# Altium footprint library Switch$.PcbLib: 117 footprints (part 5 of 8)
Each footprint in its own frame and in the unit in brackets; x right, y up, seen from the top. Pads: shape width x height; smd on the part's side, far side on the other; paste and mask are expansions set on the pad; w line width, h text height; cw(c..) or ccw(c..) is an arc to the next point about the centre after c.
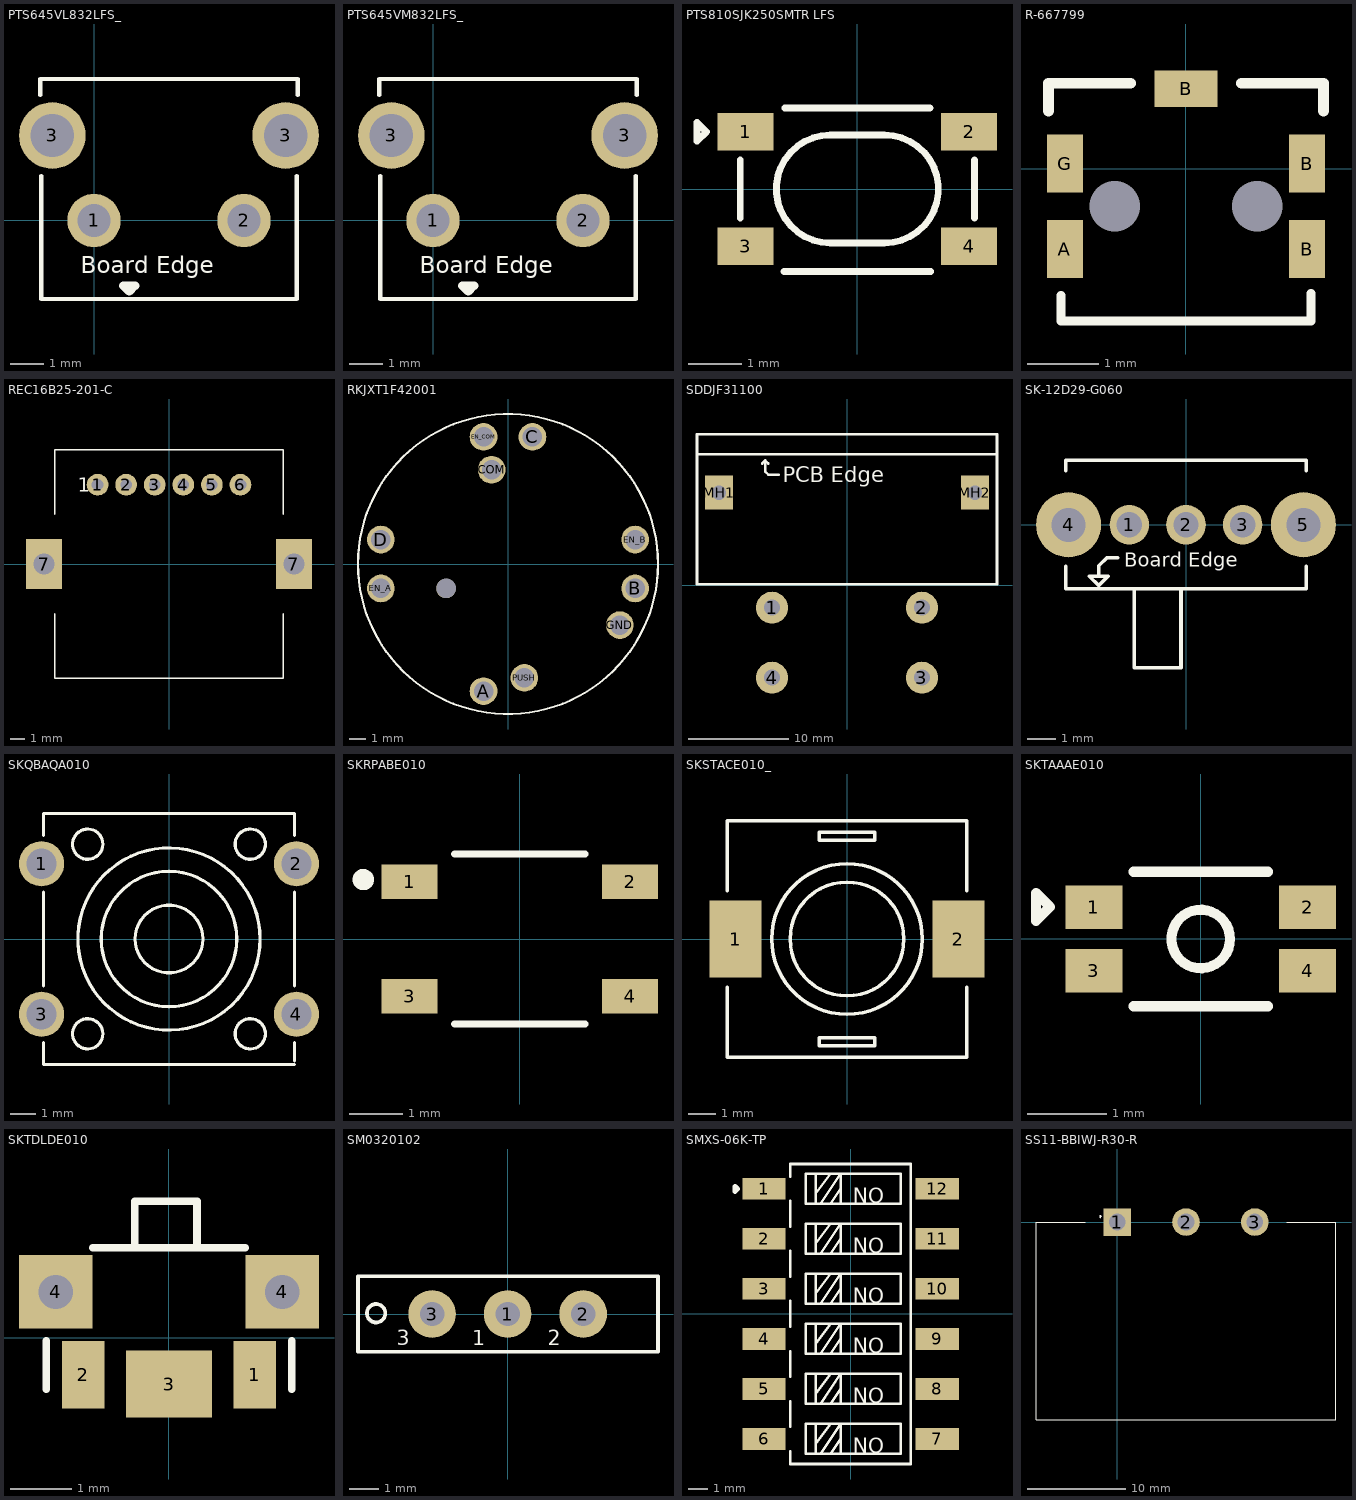
[diagram p4: the footprints below, top view; thin cyan lines are the x and y axes]

## PTS645VL832LFS_ [mm]
pads (4):
  round 1.6 hole 1: 1(0,0) 2(4.5,0)
  round 2 hole 1.3: 3(-1.25,2.55) 3(5.75,2.55)
Top Overlay:
  lines w0.127: -1.611,3.764 -1.611,4.247 6.111,4.247 6.111,3.764 ; -1.585,1.336 -1.585,-2.357 6.085,-2.357 6.085,1.336 6.085,-1.9
  lines w0.254: 0.878,-1.951 1.234,-1.951 1.056,-2.129 0.878,-1.951
  text "Board Edge" at -0.392,-1.578 h0.51
3D body "PTS645VK83-2LFS.stp": height 7.5, standoff -3.85, extent -1.997,-8.304 6.497,4.196

## PTS645VM832LFS_ [mm]
pads (4):
  round 1.6 hole 1: 1(0,0) 2(4.5,0)
  round 2 hole 1.3: 3(-1.25,2.55) 3(5.75,2.55)
Top Overlay:
  lines w0.127: -1.611,3.764 -1.611,4.247 6.111,4.247 6.111,3.764 ; -1.585,1.336 -1.585,-2.357 6.085,-2.357 6.085,1.336 6.085,-1.9
  lines w0.254: 0.878,-1.951 1.056,-2.129 1.234,-1.951 0.878,-1.951
  text "Board Edge" at -0.392,-1.578 h0.51
3D body "PTS645VK83-2LFS.stp": height 7.5, standoff -3.85, extent -1.997,-8.304 6.497,4.196

## PTS810SJK250SMTR LFS [mm]
pads (4):
  rect 1.05x0.7 smd: 1(-2.1,1.075) 2(2.1,1.075) 3(-2.1,-1.075) 4(2.1,-1.075)
Top Overlay:
  lines w0.127: -2.2,-0.544 -2.2,0.544 ; -1.381,-1.55 1.381,-1.55 ; -1.366,1.524 1.366,1.524 ; 2.2,-0.544 2.2,0.544 ; -3.014,0.897 -2.837,1.075 -3.014,1.253 -3.014,0.897 ; -0.508,-1.016 cw(c-0.508,0) -0.508,1.016 0.508,1.016 cw(c0.508,0) 0.508,-1.016 -0.508,-1.016
3D body "C221896.step": height 2.51, standoff 0, extent -2.349,-1.6 2.349,1.601

## R-667799 [mm]
pads (7):
  round 0 hole 0.711 unplated: 6(-1,-0.525) 7(1,-0.525)
  rect 0.508x0.813 smd: A(-1.7,-1.125) B(1.7,-1.125) B(1.7,0.075) G(-1.7,0.075)
  rect 0.889x0.508 smd: B(0,1.125)
Top Overlay:
  lines w0.127: -1.753,-1.778 -1.753,-2.134 1.753,-2.134 1.753,-1.753
  lines w0.152: -1.93,0.814 -1.93,1.202 -0.777,1.202 ; 0.777,1.202 1.93,1.202 1.93,0.814
3D body "R-667799.stp": height 1, standoff -0.4, extent -1.75,-2.083 1.75,1.567

## REC16B25-201-C [mm]
pads (8):
  round 1.524 hole 0.82: 1(-5,5.55) 2(-3,5.55) 3(-1,5.55) 4(1,5.55) 5(3,5.55) 6(5,5.55)
  rect 2.5x3.5 hole 1.5 square: 7(-8.75,0) 7(8.75,0)
Top Overlay:
  lines w0.127: -8,-3.481 -8,-8 8,-8 8,-3.481 ; -8,3.481 -8,8 8,8 8,3.481
  text "1" at -6.404,5.051 h1
3D body "REC16B25-201-C.STEP": height 35, standoff -3.1, extent -8.3,-7.949 8.3,8.051

## RKJXT1F42001 [mm]
pads (11):
  round 1.7 hole 1.2: A(-1.5,-7.8) B(7.8,-1.5) C(1.5,7.8) COM(-1,5.78) D(-7.8,1.5) EN_A(-7.8,-1.5) EN_B(7.8,1.5) EN_COM(-1.5,7.8) GND(6.86,-3.75) PUSH(1,-6.98)
  round 1.2 hole 1.2 unplated: ""(-3.8,-1.5)
Top Overlay:
  circle w0.127: c0,0 r9.2
3D body "RKJXT1F42001.stp": height 17.4, standoff -3.22, extent -8.6,-8.6 8.6,8.6

## SDDJF31100 [mm]
pads (6):
  round 3.2 hole 1.6: 1(-7.5,-2.25) 2(7.5,-2.25) 3(7.5,-9.25) 4(-7.5,-9.25)
  rect 2.8x3.4 hole 1.42 square: MH1(-12.8,9.25) MH2(12.8,9.25)
Top Overlay:
  lines w0.254: -8.484,12.167 -8.179,12.471 ; -7.874,12.167 -8.179,12.471 ; -6.807,11.049 -7.874,11.049 -8.179,11.354 -8.179,12.471 ; -15,13.081 -15,0.081 15,0.081 15,13.081 ; -15,13.081 -15,15.081 0,15.081 15,15.081 15,13.081 ; -15,13.081 0,13.081 15,13.081
  text "PCB Edge" at -6.426,10.287 h1.52
3D body "sddjf31100.STEP": height 17.5, standoff -1, extent -15.028,-9.621 14.977,20.079

## SK-12D29-G060 [mm]
pads (5):
  round 1.4 hole 0.9: 1(-2,0) 2(0,0) 3(2,0)
  round 2.3 hole 1.2: 4(-4.15,0) 5(4.15,0)
Top Overlay:
  lines w0.127: -4.255,-1.473 -4.255,-2.258 4.255,-2.258 4.255,-1.473 ; -4.255,1.918 -4.255,2.283 4.255,2.283 4.255,1.918 ; -3.086,-1.816 -3.086,-1.453 -2.794,-1.161 -2.414,-1.161 ; -1.829,-2.261 -1.829,-5.055 -0.178,-5.055 -0.178,-2.261 ; -3.416,-1.816 -3.086,-2.146 -2.756,-1.816 -3.416,-1.816
  text "Board Edge" at -2.183,-1.48 h0.5
3D body "G-Switch SK-12D29-G060.STEP": height 3.67, standoff -2.13, extent -4.304,-5.004 4.304,2.246

## SKQBAQA010 [mm]
pads (4):
  round 1.8 hole 1.2 paste-2539.97 mask+0.051: 1(-5.08,3) 2(5.08,3) 3(-5.08,-3) 4(5.08,-3)
Top Overlay:
  circle w0.127: c0,0 r3.632
  circle w0.127: c0,0 r2.7
  circle w0.127: c0,0 r1.35
  circle w0.127: c-3.24,3.78 r0.604
  circle w0.127: c3.24,3.78 r0.604
  circle w0.127: c3.24,-3.78 r0.604
  circle w0.127: c-3.24,-3.78 r0.604
  lines w0.127: -5,-4.128 -5,-5 5,-5 ; -5,-1.872 -5,1.872 ; -5,4.128 -5,5 5,5 5,4.128 ; 5,-4.86 5,-4.128 ; 5,-1.872 5,1.872
3D body "ALPSALPINE SKQBAQA010.STEP": height 23.2, standoff -3.52, extent -5.789,-5 5.789,5

## SKRPABE010 [mm]
height 2.5
pads (4):
  rect 1.05x0.65 smd: 1(-2.075,1.075) 2(2.075,1.075) 3(-2.075,-1.075) 4(2.075,-1.075)
Top Overlay:
  circle w0.2: c-2.946,1.118 r0.1
  lines w0.127: -1.23,-1.6 1.23,-1.6 ; -1.23,1.6 1.23,1.6
3D body "step_temp.STEP": height 2.5, standoff 0, extent -2.3,-1.6 2.3,1.6

## SKSTACE010_ [mm]
pads (2):
  rect 1.9x2.8 smd: 1(-4.05,0) 2(4.05,0)
Top Overlay:
  circle w0.127: c0,0 r2.738
  circle w0.127: c0,0 r2.067
  lines w0.127: -4.343,-1.753 -4.343,-4.293 4.343,-4.293 4.343,-1.753 ; -4.343,1.753 -4.343,4.293 4.343,4.293 4.343,1.753 ; -1,-3.881 0,-3.881 1,-3.881 1,-3.581 0,-3.581 -1,-3.581 -1,-3.881 ; -1,3.581 -1,3.881 0,3.881 1,3.881 1,3.581 0,3.581 -1,3.581
3D body "skstace010.stp": height 4, standoff 0.04, extent -4.3,-4.25 4.3,4.25

## SKTAAAE010 [mm]
pads (4):
  rect 0.72x0.55 smd: 1(-1.35,0.4) 2(1.35,0.4) 3(-1.35,-0.4) 4(1.35,-0.4)
Top Overlay:
  circle w0.127: c0,0 r0.37
  lines w0.127: -0.85,-0.85 0.85,-0.85 ; -0.85,0.85 0.85,0.85 ; -2.083,0.229 -1.905,0.406 -2.083,0.584 -2.083,0.229
3D body "C358616.step": height 0.54, standoff 0, extent -1.5,-0.8 1.5,0.8

## SKTDLDE010 [mm]
pads (5):
  rect 0.7x1.1 smd: 1(1.4,-0.599) 2(-1.4,-0.599)
  rect 1.4x1.1 smd: 3(0,-0.751)
  rect 1.2x1.2 hole 0.56: 4(-1.85,0.751) 4(1.85,0.751)
Top Overlay:
  lines w0.127: -2.007,-0.838 -2.007,-0.051 ; -1.245,1.473 -0.559,1.473 ; 1.245,1.473 0.457,1.473 ; 2.007,-0.838 2.007,-0.051 ; -0.559,1.473 0.457,1.473 ; -0.559,1.473 -0.559,2.235 0.457,2.235 0.457,1.473
3D body "SKTDLDE010.STEP": height 1.55, standoff -0.45, extent -1.95,-0.815 1.95,2.235

## SM0320102 [mm]
pads (3):
  round 1.6 hole 0.82: 1(0,0) 2(2.54,0) 3(-2.54,0)
Top Overlay:
  circle w0.127: c-4.42,0.025 r0.31
  lines w0.127: -5.029,-1.27 5.055,-1.27 5.055,1.27 -5.029,1.27 -5.029,-1.27
  text "2" at 1.353,-1.043 h0.5
  text "1" at -1.187,-1.043 h0.5
  text "3" at -3.727,-1.043 h0.5
3D body "sm-03201-02.stp": height 1.4, standoff -10, extent -5,-1.22 5.001,1.22

## SMXS-06K-TP [mm]
pads (12):
  rect 2.2x1.1 smd: 1(-4.4,6.35) 2(-4.4,3.81) 3(-4.4,1.27) 4(-4.4,-1.27) 5(-4.4,-3.81) 6(-4.4,-6.35) 7(4.4,-6.35) 8(4.4,-3.81) 9(4.4,-1.27) 10(4.4,1.27) 11(4.4,3.81) 12(4.4,6.35)
Top Overlay:
  lines w0.127: -3.08,-6.965 -3.08,-7.62 3.048,-7.62 3.048,7.61 -3.08,7.61 -3.08,6.965 ; -3.08,-5.735 -3.08,-4.425 ; -3.08,-3.195 -3.08,-1.885 ; -3.08,-0.655 -3.08,0.655 ; -3.08,1.885 -3.08,3.195 ; -3.08,4.425 -3.08,5.735 ; -1.785,-7.112 -1.785,-5.588 ; -1.785,-6.604 -1.023,-5.588 ; -1.785,-4.572 -1.785,-3.048 ; -1.785,-4.064 -1.023,-3.048 ; -1.785,-2.032 -1.785,-0.508 ; -1.785,-1.524 -1.023,-0.508 ; -1.785,0.508 -1.785,2.032 ; -1.785,1.016 -1.023,2.032 ; -1.785,3.048 -1.785,4.572 ; -1.785,3.556 -1.023,4.572 ; -1.785,5.588 -1.785,7.112 ; -1.785,6.096 -1.023,7.112 ; -1.531,-7.112 -0.515,-5.588 -0.515,-7.112 ; -1.531,-4.572 -0.515,-3.048 -0.515,-4.572 ; -1.531,-2.032 -0.515,-0.508 -0.515,-2.032 ; -1.531,0.508 -0.515,2.032 -0.515,0.508 ; -1.531,3.048 -0.515,4.572 -0.515,3.048 ; -1.531,5.588 -0.515,7.112 -0.515,5.588 ; -1.023,-7.112 -0.515,-6.35 ; -1.023,-4.572 -0.515,-3.81 ; -1.023,-2.032 -0.515,-1.27 ; -1.023,0.508 -0.515,1.27 ; -1.023,3.048 -0.515,3.81 ; -1.023,5.588 -0.515,6.35 ; -2.293,-7.112 2.533,-7.112 2.533,-5.588 -2.293,-5.588 -2.293,-7.112 ; -2.293,-4.572 -2.293,-3.048 2.533,-3.048 2.533,-4.572 -2.293,-4.572 ; -2.293,-2.032 2.533,-2.032 2.533,-0.508 -2.293,-0.508 -2.293,-2.032 ; -2.293,0.508 -2.293,2.032 2.533,2.032 2.533,0.508 -2.293,0.508 ; -2.293,3.048 2.533,3.048 2.533,4.572 -2.293,4.572 -2.293,3.048 ; -2.293,5.588 -2.293,7.112 2.533,7.112 2.533,5.588 -2.293,5.588
  lines w0.254: -5.879,6.226 -5.879,6.48 -5.752,6.353 -5.879,6.226
  text "ON" at 1.69,-6.29 h0.76
  text "ON" at 1.69,-3.75 h0.76
  text "ON" at 1.69,-1.21 h0.76
  text "ON" at 1.69,1.33 h0.76
  text "ON" at 1.69,3.87 h0.76
  text "ON" at 1.69,6.41 h0.76
3D body "C5439765.step": height 4, standoff 0, extent -4.7,-7.625 4.7,7.625

## SS11-BBIWJ-R30-R [mm]
pads (3):
  rect 2.8x2.8 hole 1.7: 1(0,0)
  round 2.8 hole 1.7: 2(7,0) 3(14,0)
Top Overlay:
  lines w0.1: -1.727,0.457 -1.6,0.584 -1.727,0.711 -1.727,0.457
  lines w0.127: -3.25,0 -8.25,0 -8.25,-20.1 22.25,-20.1 22.25,0 17.25,0